# Altium integrated library XCZU15EG-F V1.0封装库.IntLib: 119 symbols
Pins are listed as number, name and electrical type; pins without a type are passive.

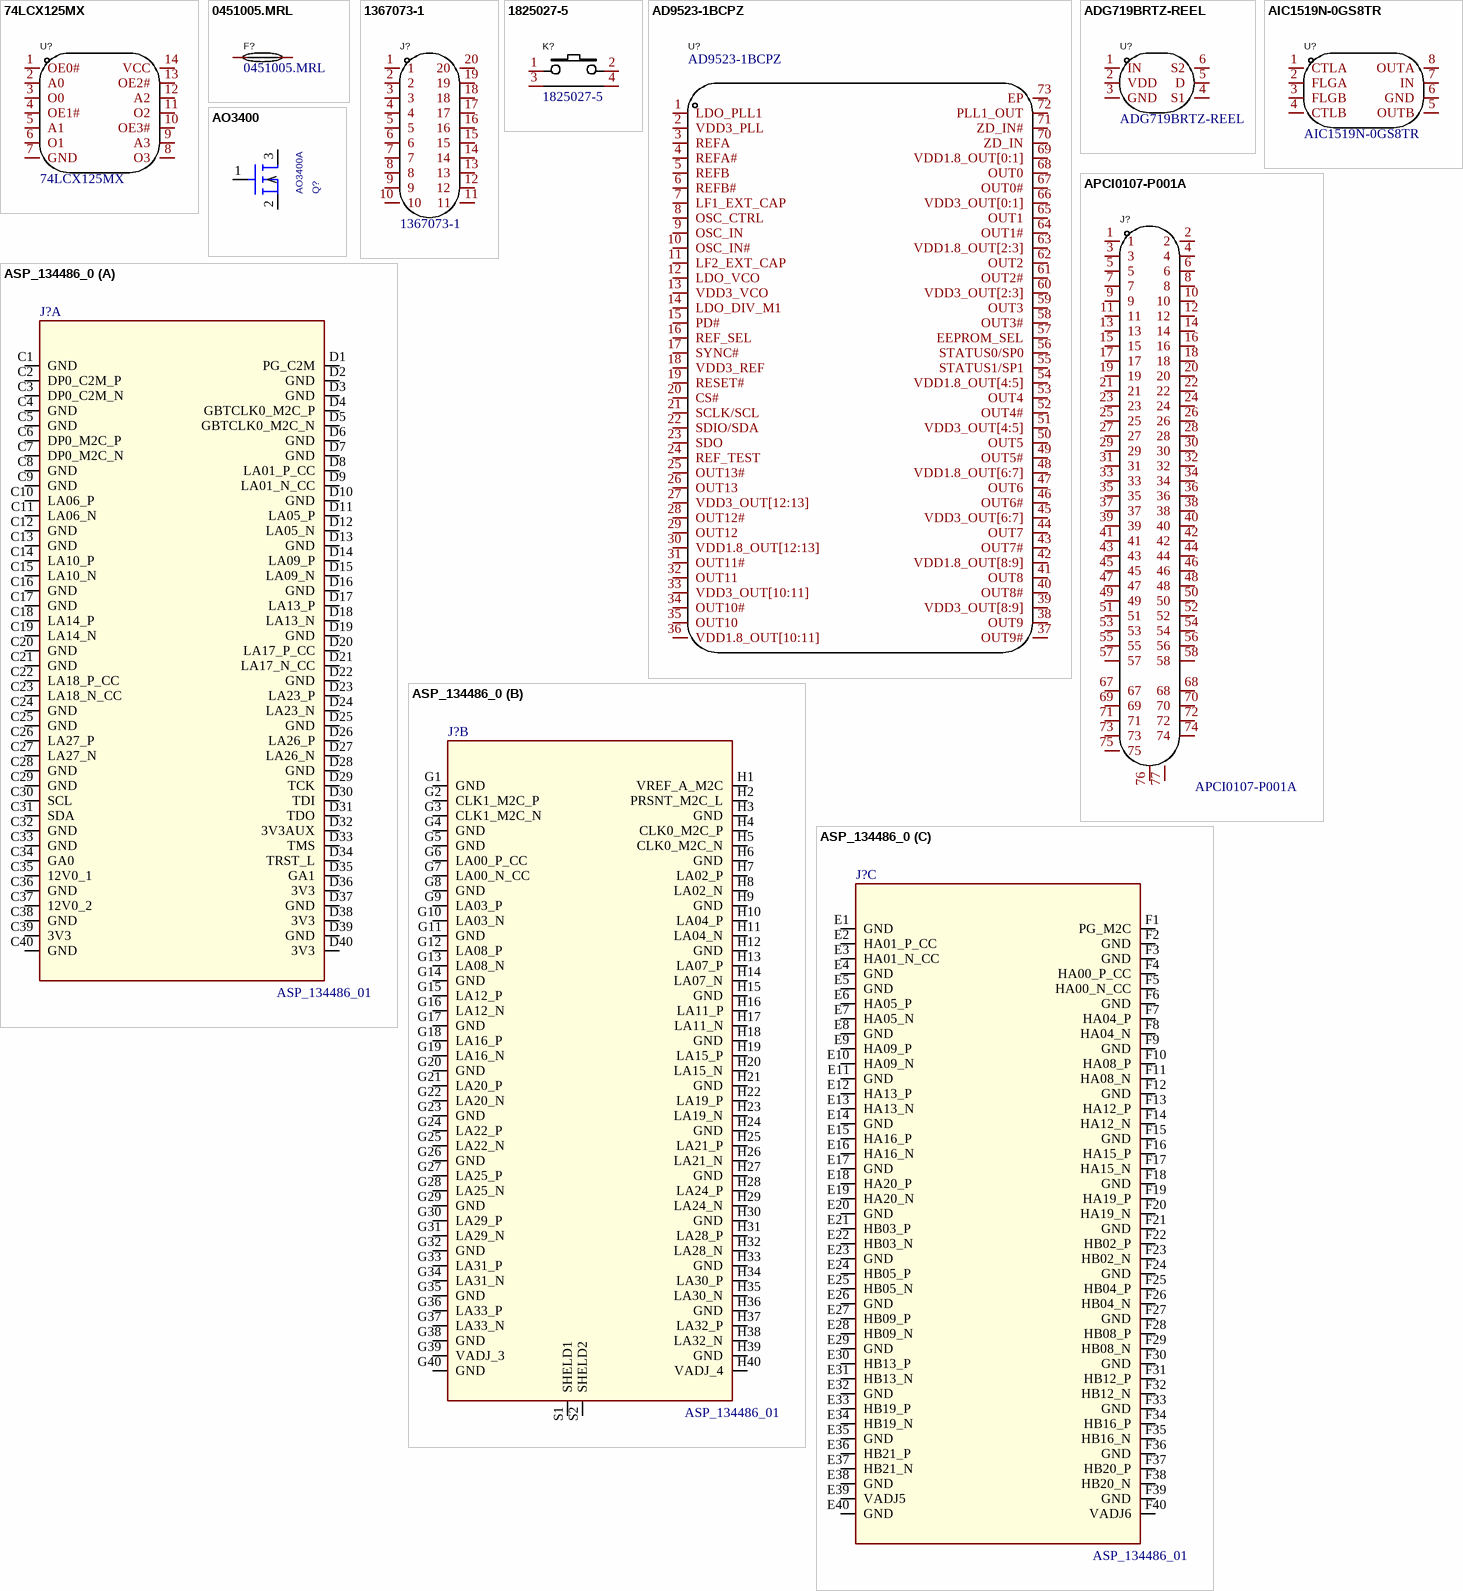
[diagram p0: symbols 74LCX125MX to ASP_134486_0]

## 74LCX125MX
designator U?
Manufacturer: onsemi(安森美); Add into BOM: yes; Name: 74LCX125MX; Symbol: 74LCX125MX; Device: 74LCX125MX; LCSC Part Name: 带 5V 耐受输入和输出的低压四路缓冲器; Supplier Part: C238953; Manufacturer Part: 74LCX125MX; Supplier Footprint: SOIC-14; JLCPCB Part Class: Extended Part; Datasheet: https://atta.szlcsc.com/upload/public/pdf/source/20181011/C238953_951DDD2013900C09DA0753F25BF700AB.pdf; Supplier: LCSC; Convert to PCB: yes
footprint SOIC127P600X175-14N
3D model SOIC-14_L8.6-W3.9-P1.27-LS6.0-BL
pins: 1 OE0#, 2 A0, 3 O0, 4 OE1#, 5 A1, 6 O1, 7 GND, 8 O3, 9 A3, 10 OE3#, 11 O2, 12 A2, 13 OE2#, 14 VCC

## 0451005.MRL
designator F?
Manufacturer: Littelfuse(美国力特); Add into BOM: yes; Type: 贴片式保险丝; Current Rating: 5A; Voltage Rating  (AC): 125V; Breaking Capacity: 50A; Name: 0451005.MRL; Symbol: 0451005.MRL; Device: 0451005.MRL; LCSC Part Name: 5A 125V 超快断; Supplier Part: C48467; Manufacturer Part: 0451005.MRL; Supplier Footprint: SMD; JLCPCB Part Class: Extended Part; Datasheet: https://atta.szlcsc.com/upload/public/pdf/source/20171109/C48467_15102201734031103760.pdf; Supplier: LCSC; Convert to PCB: yes; Voltage Rating (DC): 125V; Operating Temperature: -55℃~+125℃
footprint FUSE-SMD_L6.1-W2.6
3D model FUSE-SMD_L6.1-W2.6-H2.6
pins: 1, 2

## 1367073-1
designator J?
Manufacturer: TE Connectivity(美国泰科); Add into BOM: yes; Connector Type: SFP; Pitch: 0.8mm; Name: 1367073-1; Symbol: 1367073-1; Device: 1367073-1; LCSC Part Name: SFP 0.8mm P数:20; Supplier Part: C210158; Manufacturer Part: 1367073-1; Supplier Footprint: SMD,P=0.8mm; JLCPCB Part Class: Extended Part; Datasheet: https://atta.szlcsc.com/upload/public/pdf/source/20180424/C210158_9AFB8833F6096AB4A074A402FFBE4003.pdf; Supplier: LCSC; Convert to PCB: yes; Number of Pins: 20; Mounting Style: 卧贴; Height Above Board: 5.4mm; Operating Temperature Range: -
footprint SFP-SMD_1367073-1
3D model SFP-SMD_1367073-1
pins: 1, 2, 3, 4, 5, 6, 7, 8, 9, 10, 11, 12, 13, 14, 15, 16, 17, 18, 19, 20

## 1825027-5
designator K?
Manufacturer: TE Connectivity(美国泰科); Add into BOM: yes; Contact Current: 50mA; Voltage Rating (DC): 24V; Circuit: 单刀单掷; Actuator Style: 圆形按钮; Switch Length: 7mm; Switch Width: 3.5mm; Switch Height: 1.24mm; Name: 1825027-5; Symbol: 1825027-5; Device: 1825027-5; LCSC Part Name: 7*3.5*1.24mm 卧插 轻触开关; Supplier Part: C86476; Manufacturer Part: 1825027-5; Supplier Footprint: 插件; JLCPCB Part Class: Extended Part; Datasheet: https://atta.szlcsc.com/upload/public/pdf/source/20161105/1478330327555.pdf; Supplier: LCSC; Convert to PCB: yes; Mounting Style: 卧插; With Lamp: -; Mechanical Life: -
footprint KEY-TH_4P-L7.5-W6.8-P4.50-LS7.2
3D model KEY-TH_4P-L7.5-W6.8-P4.50-LS7.2
pins: 1, 2, 3 MH1, 4 MH2

## AD9523-1BCPZ
designator U?
Manufacturer: ADI(亚德诺)/LINEAR; Add into BOM: yes; Name: AD9523-1BCPZ; Symbol: AD9523-1BCPZ; Device: AD9523-1BCPZ; LCSC Part Name: AD9523-1BCPZ; Supplier Part: C653546; Manufacturer Part: AD9523-1BCPZ; Supplier Footprint: LFCSP-72; JLCPCB Part Class: Extended Part; Datasheet: https://atta.szlcsc.comnull; Supplier: LCSC; Convert to PCB: yes
footprint QFN50P975X1000X100-73N-D
3D model LFCSP-72_L10.0-W10.0-H0.9-P0.50-BL-EP4.7
pins: 1 LDO_PLL1, 2 VDD3_PLL, 3 REFA, 4 REFA#, 5 REFB, 6 REFB#, 7 LF1_EXT_CAP, 8 OSC_CTRL, 9 OSC_IN, 10 OSC_IN#, 11 LF2_EXT_CAP, 12 LDO_VCO, 13 VDD3_VCO, 14 LDO_DIV_M1, 15 PD#, 16 REF_SEL, 17 SYNC#, 18 VDD3_REF, 19 RESET#, 20 CS#, 21 SCLK/SCL, 22 SDIO/SDA, 23 SDO, 24 REF_TEST, 25 OUT13#, 26 OUT13, 27 VDD3_OUT[12:13], 28 OUT12#, 29 OUT12, 30 VDD1.8_OUT[12:13], 31 OUT11#, 32 OUT11, 33 VDD3_OUT[10:11], 34 OUT10#, 35 OUT10, 36 VDD1.8_OUT[10:11], 37 OUT9#, 38 OUT9, 39 VDD3_OUT[8:9], 40 OUT8#, 41 OUT8, 42 VDD1.8_OUT[8:9], 43 OUT7#, 44 OUT7, 45 VDD3_OUT[6:7], 46 OUT6#, 47 OUT6, 48 VDD1.8_OUT[6:7], 49 OUT5#, 50 OUT5, 51 VDD3_OUT[4:5], 52 OUT4#, 53 OUT4, 54 VDD1.8_OUT[4:5], 55 STATUS1/SP1, 56 STATUS0/SP0, 57 EEPROM_SEL, 58 OUT3#, 59 OUT3, 60 VDD3_OUT[2:3], 61 OUT2#, 62 OUT2, 63 VDD1.8_OUT[2:3], 64 OUT1#, 65 OUT1, 66 VDD3_OUT[0:1], 67 OUT0#, 68 OUT0, 69 VDD1.8_OUT[0:1], 70 ZD_IN, 71 ZD_IN#, 72 PLL1_OUT, 73 EP

## ADG719BRTZ-REEL
designator U?
Manufacturer: ADI(亚德诺)/LINEAR(凌特); Add into BOM: yes; Name: ADG719BRTZ-REEL; Symbol: ADG719BRTZ-REEL; Device: ADG719BRTZ-REEL; LCSC Part Name: ADG719BRTZ-REEL; Supplier Part: C579097; Manufacturer Part: ADG719BRTZ-REEL; Supplier Footprint: SOT-23-6; JLCPCB Part Class: Extended Part; Datasheet: https://atta.szlcsc.com/upload/public/pdf/source/20210224/C579097_EADA6BC909D9A920B352ABFA41AC0F4A.pdf; Supplier: LCSC; Convert to PCB: yes
footprint SOT23-6L (3x1.6x1.1mm(长宽高))
3D model SOT-23-6_L2.9-W1.6-H1.5-LS2.8-P0.95
pins: 1 IN, 2 VDD, 3 GND, 4 S1, 5 D, 6 S2

## AIC1519N-0GS8TR
designator U?
Manufacturer: AIC(沛亨半导体); Add into BOM: yes; Name: AIC1519N-0GS8TR; Symbol: AIC1519N-0GS8TR; Device: AIC1519N-0GS8TR; LCSC Part Name: AIC1519N-0GS8TR; Supplier Part: C211637; Manufacturer Part: AIC1519N-0GS8TR; Supplier Footprint: SOP-8; JLCPCB Part Class: Extended Part; Datasheet: https://atta.szlcsc.com/upload/public/pdf/source/20180412/C211637_FBDD21F597983625A50951D5B97D9666.pdf; Supplier: LCSC; Convert to PCB: yes
footprint SOP8
3D model SOP-8_L5.0-W4.0-H1.8-LS6.2-P1.27
pins: 1 CTLA, 2 FLGA, 3 FLGB, 4 CTLB, 5 OUTB, 6 GND, 7 IN, 8 OUTA

## AO3400
designator Q?, comment AO3400A
PSpiceTemplate: X^@REFDES %d %g %s @MODEL
footprint SOT23-3L (3x1.3x1mm(长宽高))
simulation model AO3400
pins: 1 G, 2 S, 3 D

## APCI0107-P001A
designator J?
Designer: U?; Symbol: APCI0107-P001A; Device: APCI0107-P001A
footprint CONN-SMD_APCI0107-P001A
pins: 1, 2, 3, 4, 5, 6, 7, 8, 9, 10, 11, 12, 13, 14, 15, 16, 17, 18, 19, 20, 21, 22, 23, 24, 25, 26, 27, 28, 29, 30, 31, 32, 33, 34, 35, 36, 37, 38, 39, 40, 41, 42, 43, 44, 45, 46, 47, 48, 49, 50, 51, 52, 53, 54, 55, 56, 57, 58, 67, 68, 69, 70, 71, 72, 73, 74, 75, 76, 77

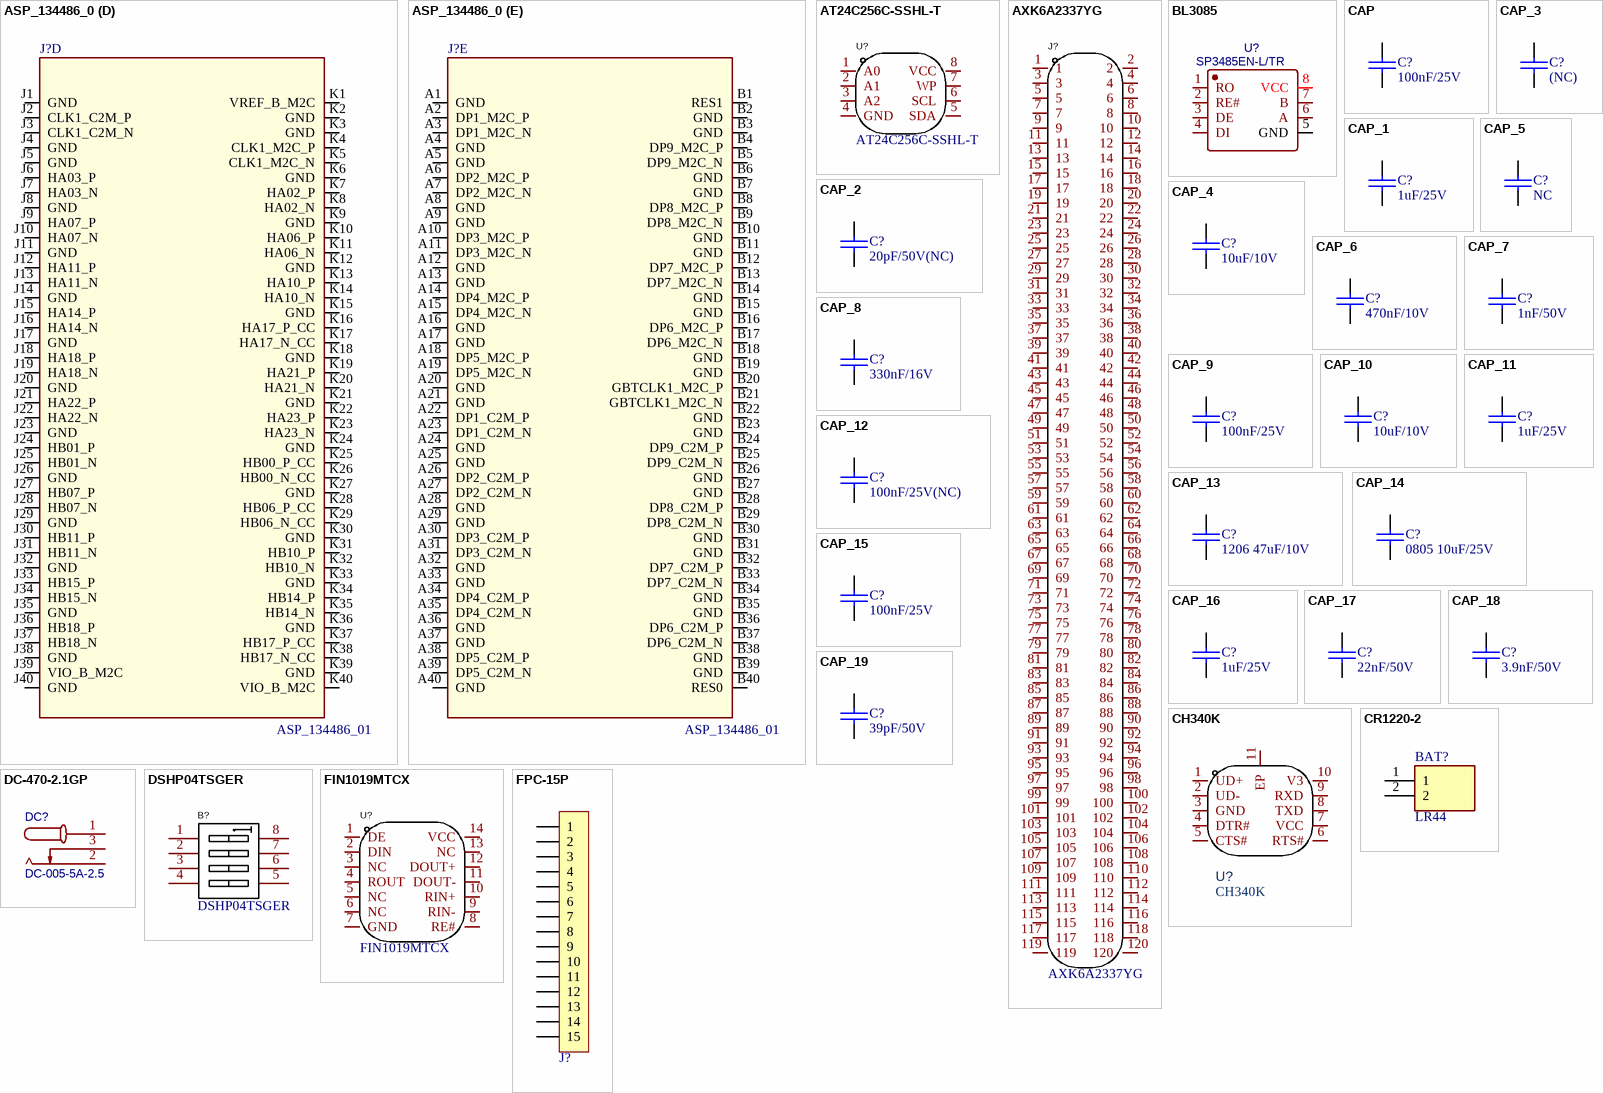
[diagram p1: symbols ASP_134486_0 to FPC-15P]

## ASP_134486_0
designator J?, comment ASP_134486_01
footprint ASP13448601
part A pins: C1 GND (power), C2 DP0_C2M_P, C3 DP0_C2M_N, C4 GND (power), C5 GND (power), C6 DP0_M2C_P, C7 DP0_M2C_N, C8 GND (power), C9 GND (power), C10 LA06_P, C11 LA06_N, C12 GND (power), C13 GND (power), C14 LA10_P, C15 LA10_N, C16 GND (power), C17 GND (power), C18 LA14_P, C19 LA14_N, C20 GND (power), C21 GND (power), C22 LA18_P_CC, C23 LA18_N_CC, C24 GND (power), C25 GND (power), C26 LA27_P, C27 LA27_N, C28 GND (power), C29 GND (power), C30 SCL, C31 SDA, C32 GND (power), C33 GND (power), C34 GA0, C35 12V0_1, C36 GND (power), C37 12V0_2, C38 GND (power), C39 3V3 (power), C40 GND (power), D1 PG_C2M, D2 GND (power), D3 GND (power), D4 GBTCLK0_M2C_P, D5 GBTCLK0_M2C_N, D6 GND (power), D7 GND (power), D8 LA01_P_CC, D9 LA01_N_CC, D10 GND (power), D11 LA05_P, D12 LA05_N, D13 GND (power), D14 LA09_P, D15 LA09_N, D16 GND (power), D17 LA13_P, D18 LA13_N, D19 GND (power), D20 LA17_P_CC, D21 LA17_N_CC, D22 GND (power), D23 LA23_P, D24 LA23_N, D25 GND (power), D26 LA26_P, D27 LA26_N, D28 GND (power), D29 TCK, D30 TDI, D31 TDO, D32 3V3AUX, D33 TMS, D34 TRST_L, D35 GA1, D36 3V3 (power), D37 GND (power), D38 3V3 (power), D39 GND (power), D40 3V3 (power)
part B pins: G1 GND (power), G2 CLK1_M2C_P, G3 CLK1_M2C_N, G4 GND (power), G5 GND (power), G6 LA00_P_CC, G7 LA00_N_CC, G8 GND (power), G9 LA03_P, G10 LA03_N, G11 GND (power), G12 LA08_P, G13 LA08_N, G14 GND (power), G15 LA12_P, G16 LA12_N, G17 GND (power), G18 LA16_P, G19 LA16_N, G20 GND (power), G21 LA20_P, G22 LA20_N, G23 GND (power), G24 LA22_P, G25 LA22_N, G26 GND (power), G27 LA25_P, G28 LA25_N, G29 GND (power), G30 LA29_P, G31 LA29_N, G32 GND (power), G33 LA31_P, G34 LA31_N, G35 GND (power), G36 LA33_P, G37 LA33_N, G38 GND (power), G39 VADJ_3, G40 GND (power), H1 VREF_A_M2C, H2 PRSNT_M2C_L, H3 GND (power), H4 CLK0_M2C_P, H5 CLK0_M2C_N, H6 GND (power), H7 LA02_P, H8 LA02_N, H9 GND (power), H10 LA04_P, H11 LA04_N, H12 GND (power), H13 LA07_P, H14 LA07_N, H15 GND (power), H16 LA11_P, H17 LA11_N, H18 GND (power), H19 LA15_P, H20 LA15_N, H21 GND (power), H22 LA19_P, H23 LA19_N, H24 GND (power), H25 LA21_P, H26 LA21_N, H27 GND (power), H28 LA24_P, H29 LA24_N, H30 GND (power), H31 LA28_P, H32 LA28_N, H33 GND (power), H34 LA30_P, H35 LA30_N, H36 GND (power), H37 LA32_P, H38 LA32_N, H39 GND (power), H40 VADJ_4, S1 SHELD1, S2 SHELD2
part C pins: E1 GND (power), E2 HA01_P_CC, E3 HA01_N_CC, E4 GND (power), E5 GND (power), E6 HA05_P, E7 HA05_N, E8 GND (power), E9 HA09_P, E10 HA09_N, E11 GND (power), E12 HA13_P, E13 HA13_N, E14 GND (power), E15 HA16_P, E16 HA16_N, E17 GND (power), E18 HA20_P, E19 HA20_N, E20 GND (power), E21 HB03_P, E22 HB03_N, E23 GND (power), E24 HB05_P, E25 HB05_N, E26 GND (power), E27 HB09_P, E28 HB09_N, E29 GND (power), E30 HB13_P, E31 HB13_N, E32 GND (power), E33 HB19_P, E34 HB19_N, E35 GND (power), E36 HB21_P, E37 HB21_N, E38 GND (power), E39 VADJ5 (power), E40 GND (power), F1 PG_M2C, F2 GND (power), F3 GND (power), F4 HA00_P_CC, F5 HA00_N_CC, F6 GND (power), F7 HA04_P, F8 HA04_N, F9 GND (power), F10 HA08_P, F11 HA08_N, F12 GND (power), F13 HA12_P, F14 HA12_N, F15 GND (power), F16 HA15_P, F17 HA15_N, F18 GND (power), F19 HA19_P, F20 HA19_N, F21 GND (power), F22 HB02_P, F23 HB02_N, F24 GND (power), F25 HB04_P, F26 HB04_N, F27 GND (power), F28 HB08_P, F29 HB08_N, F30 GND (power), F31 HB12_P, F32 HB12_N, F33 GND (power), F34 HB16_P, F35 HB16_N, F36 GND (power), F37 HB20_P, F38 HB20_N, F39 GND (power), F40 VADJ6 (power)
part D pins: J1 GND (power), J2 CLK1_C2M_P, J3 CLK1_C2M_N, J4 GND (power), J5 GND (power), J6 HA03_P, J7 HA03_N, J8 GND (power), J9 HA07_P, J10 HA07_N, J11 GND (power), J12 HA11_P, J13 HA11_N, J14 GND (power), J15 HA14_P, J16 HA14_N, J17 GND (power), J18 HA18_P, J19 HA18_N, J20 GND (power), J21 HA22_P, J22 HA22_N, J23 GND (power), J24 HB01_P, J25 HB01_N, J26 GND (power), J27 HB07_P, J28 HB07_N, J29 GND (power), J30 HB11_P, J31 HB11_N, J32 GND (power), J33 HB15_P, J34 HB15_N, J35 GND (power), J36 HB18_P, J37 HB18_N, J38 GND (power), J39 VIO_B_M2C (power), J40 GND (power), K1 VREF_B_M2C, K2 GND (power), K3 GND (power), K4 CLK1_M2C_P, K5 CLK1_M2C_N, K6 GND (power), K7 HA02_P, K8 HA02_N, K9 GND (power), K10 HA06_P, K11 HA06_N, K12 GND (power), K13 HA10_P, K14 HA10_N, K15 GND (power), K16 HA17_P_CC, K17 HA17_N_CC, K18 GND (power), K19 HA21_P, K20 HA21_N, K21 GND (power), K22 HA23_P, K23 HA23_N, K24 GND (power), K25 HB00_P_CC, K26 HB00_N_CC, K27 GND (power), K28 HB06_P_CC, K29 HB06_N_CC, K30 GND (power), K31 HB10_P, K32 HB10_N, K33 GND (power), K34 HB14_P, K35 HB14_N, K36 GND (power), K37 HB17_P_CC, K38 HB17_N_CC, K39 GND (power), K40 VIO_B_M2C (power)
part E pins: A1 GND (power), A2 DP1_M2C_P, A3 DP1_M2C_N, A4 GND (power), A5 GND (power), A6 DP2_M2C_P, A7 DP2_M2C_N, A8 GND (power), A9 GND (power), A10 DP3_M2C_P, A11 DP3_M2C_N, A12 GND (power), A13 GND (power), A14 DP4_M2C_P, A15 DP4_M2C_N, A16 GND (power), A17 GND (power), A18 DP5_M2C_P, A19 DP5_M2C_N, A20 GND (power), A21 GND (power), A22 DP1_C2M_P, A23 DP1_C2M_N, A24 GND (power), A25 GND (power), A26 DP2_C2M_P, A27 DP2_C2M_N, A28 GND (power), A29 GND (power), A30 DP3_C2M_P, A31 DP3_C2M_N, A32 GND (power), A33 GND (power), A34 DP4_C2M_P, A35 DP4_C2M_N, A36 GND (power), A37 GND (power), A38 DP5_C2M_P, A39 DP5_C2M_N, A40 GND (power), B1 RES1, B2 GND (power), B3 GND (power), B4 DP9_M2C_P, B5 DP9_M2C_N, B6 GND (power), B7 GND (power), B8 DP8_M2C_P, B9 DP8_M2C_N, B10 GND (power), B11 GND (power), B12 DP7_M2C_P, B13 DP7_M2C_N, B14 GND (power), B15 GND (power), B16 DP6_M2C_P, B17 DP6_M2C_N, B18 GND (power), B19 GND (power), B20 GBTCLK1_M2C_P, B21 GBTCLK1_M2C_N, B22 GND (power), B23 GND (power), B24 DP9_C2M_P, B25 DP9_C2M_N, B26 GND (power), B27 GND (power), B28 DP8_C2M_P, B29 DP8_C2M_N, B30 GND (power), B31 GND (power), B32 DP7_C2M_P, B33 DP7_C2M_N, B34 GND (power), B35 GND (power), B36 DP6_C2M_P, B37 DP6_C2M_N, B38 GND (power), B39 GND (power), B40 RES0

## AT24C256C-SSHL-T
designator U?
Manufacturer: MICROCHIP(美国微芯); Add into BOM: yes; Name: AT24C256C-SSHL-T; Symbol: AT24C256C-SSHL-T; Device: AT24C256C-SSHL-T; LCSC Part Name: AT24C256C-SSHL-T; Supplier Part: C6482; Manufacturer Part: AT24C256C-SSHL-T; Supplier Footprint: SOIC-8-150mil; JLCPCB Part Class: Basic Part; Datasheet: https://atta.szlcsc.com/upload/public/pdf/source/20140724/1457707164965.pdf; Supplier: LCSC; Convert to PCB: yes
footprint SOIC127P600X175-8N
3D model SOIC-8_L4.9-W3.9-H1.7-LS6.0-P1.27
pins: 1 A0, 2 A1, 3 A2, 4 GND, 5 SDA, 6 SCL, 7 WP, 8 VCC

## AXK6A2337YG
designator J?
Designer: U?; Symbol: AXK6A2337YG; Device: AXK6A2337YG
footprint AXK6A2337YG
pins: 1, 2, 3, 4, 5, 6, 7, 8, 9, 10, 11, 12, 13, 14, 15, 16, 17, 18, 19, 20, 21, 22, 23, 24, 25, 26, 27, 28, 29, 30, 31, 32, 33, 34, 35, 36, 37, 38, 39, 40, 41, 42, 43, 44, 45, 46, 47, 48, 49, 50, 51, 52, 53, 54, 55, 56, 57, 58, 59, 60, 61, 62, 63, 64, 65, 66, 67, 68, 69, 70, 71, 72, 73, 74, 75, 76, 77, 78, 79, 80, 81, 82, 83, 84, 85, 86, 87, 88, 89, 90, 91, 92, 93, 94, 95, 96, 97, 98, 99, 100, 101, 102, 103, 104, 105, 106, 107, 108, 109, 110, 111, 112, 113, 114, 115, 116, 117, 118, 119, 120

## BL3085
designator U?, comment SP3485EN-L/TR
RS485芯片(3V-5.5V,10M); BOM_Manufacturer: BL; BOM_Manufacturer Part: BL3085; Contributor: LCSC; SMT Type: Extend; 物料编码: 6131.000108; BOM_Supplier: LCSC; BOM_Supplier Part: C128803; BOM_JLCPCB SMD: Yes; spicePre: U; spiceSymbolName: BL3085
footprint SOIC127P600X175-8N
pins: 1 RO, 2 RE#, 3 DE, 4 DI, 5 GND, 6 A, 7 B, 8 VCC

## CAP
designator C?, comment 100nF/25V
贴片X7R电容
footprint 0402_C
pins: 1, 2
2 alternate drawings of the same symbol

## CAP_1
designator C?, comment 1uF/25V
贴片X7R电容
footprint 0402_C
pins: 1, 2
2 alternate drawings of the same symbol

## CAP_2
designator C?, comment 20pF/50V(NC)
贴片X7R电容
footprint 0402_C
pins: 1, 2
2 alternate drawings of the same symbol

## CAP_3
designator C?, comment (NC)
贴片X7R电容
footprint 0402_C
pins: 1, 2
2 alternate drawings of the same symbol

## CAP_4
designator C?, comment 10uF/10V
贴片X7R电容
footprint 0402_C
pins: 1, 2
2 alternate drawings of the same symbol

## CAP_5
designator C?, comment NC
贴片X7R电容
footprint 0402_C
pins: 1, 2
2 alternate drawings of the same symbol

## CAP_6
designator C?, comment 470nF/10V
贴片X7R电容
footprint 0402_C
pins: 1, 2
2 alternate drawings of the same symbol

## CAP_7
designator C?, comment 1nF/50V
贴片X7R电容
footprint 0402_C
pins: 1, 2
2 alternate drawings of the same symbol

## CAP_8
designator C?, comment 330nF/16V
贴片X7R电容
footprint 0402_C
pins: 1, 2
2 alternate drawings of the same symbol

## CAP_9
designator C?, comment 100nF/25V
贴片X7R电容
footprint 0402_C
pins: 1, 2
2 alternate drawings of the same symbol

## CAP_10
designator C?, comment 10uF/10V
贴片X7R电容
footprint 0402_C
pins: 1, 2
2 alternate drawings of the same symbol

## CAP_11
designator C?, comment 1uF/25V
贴片X7R电容
footprint 0402_C
pins: 1, 2
2 alternate drawings of the same symbol

## CAP_12
designator C?, comment 100nF/25V(NC)
贴片X7R电容
footprint 0402_C
pins: 1, 2
2 alternate drawings of the same symbol

## CAP_13
designator C?, comment 1206 47uF/10V
贴片X7R电容
footprint 1206_C
pins: 1, 2
2 alternate drawings of the same symbol

## CAP_14
designator C?, comment 0805 10uF/25V
贴片X7R电容
footprint 0805_C
pins: 1, 2
2 alternate drawings of the same symbol

## CAP_15
designator C?, comment 100nF/25V
贴片X7R电容
footprint 0402_C
pins: 1, 2
2 alternate drawings of the same symbol

## CAP_16
designator C?, comment 1uF/25V
贴片X7R电容
footprint 0402_C
pins: 1, 2
2 alternate drawings of the same symbol

## CAP_17
designator C?, comment 22nF/50V
贴片X7R电容
footprint 0402_C
pins: 1, 2
2 alternate drawings of the same symbol

## CAP_18
designator C?, comment 3.9nF/50V
贴片X7R电容
footprint 0402_C
pins: 1, 2
2 alternate drawings of the same symbol

## CAP_19
designator C?, comment 39pF/50V
贴片X7R电容
footprint 0402_C
pins: 1, 2
2 alternate drawings of the same symbol

## CH340K
designator U?
Manufacturer: WCH(南京沁恒); Add into BOM: yes; Name: CH340K; Symbol: CH340K; Device: CH340K; LCSC Part Name: CH340K USB转串口芯片 CH340; Supplier Part: C968586; Manufacturer Part: CH340K; Supplier Footprint: ESOP-10-EP-150mil; JLCPCB Part Class: Extended Part; Datasheet: https://atta.szlcsc.com/upload/public/pdf/source/20200819/C84681_ADBED554CE321879DBD6B1D06488689C.pdf; Supplier: LCSC; Convert to PCB: yes; Applications Function: -; Protocol: -
footprint ESOP-10_L4.9-W3.9-P1.00-LS6.2-BL-EP
3D model ESOP-10_L4.9-W3.9-H1.4-P1.00-LS6.2-BL-EP
pins: 1 UD+, 2 UD-, 3 GND, 4 DTR#, 5 CTS#, 6 RTS#, 7 VCC, 8 TXD, 9 RXD, 10 V3, 11 EP

## CR1220-2
designator BAT?, comment LR44
g; Manufacturer_Name: Q&J; Manufacturer_Part_Number: CR1220-2; Geometry.Height: 4.1mm; Mouser Part Number: *; Mouser Price/Stock: *; Arrow Part Number: *; Arrow Price/Stock: *; Datasheet Link: https://datasheet.lcsc.com/szlcsc/Q-J-CR1220-2_C70381.pdf
footprint LR44 (BATT_CON)
pins: 1, 2

## DC-470-2.1GP
designator DC?, comment DC-005-5A-2.5
BOM_Manufacturer: GANGYUAN; BOM_Manufacturer Part: DC-470-2.1GP; Contributor: LCSC; BOM_Supplier: LCSC; BOM_Supplier Part: C194407; BOM_JLCPCB Part Class: Extended Part; spicePre: D; spiceSymbolName: DC-470-2.1GP
footprint DC-005 (5.5*2.1mm，DC30V,2.5A)
pins: 1, 2, 3

## DSHP04TSGER
designator B?
Designer: U?; Symbol: DSHP04TSGER; Device: DSHP04TSGER
footprint SW-SMD_8P-L6.7-W5.4-P1.27-LS8.4
pins: 1 A1, 2 A2, 3 A3, 4 A4, 5 B4, 6 B3, 7 B2, 8 B1

## FIN1019MTCX
designator U?
Manufacturer: onsemi(安森美); Add into BOM: yes; Name: FIN1019MTCX; Symbol: FIN1019MTCX; Device: FIN1019MTCX; LCSC Part Name: 3.3V LVDS 高速差分驱动器/接收器; Supplier Part: C903667; Manufacturer Part: FIN1019MTCX; Supplier Footprint: TSSOP-14; JLCPCB Part Class: Extended Part; Datasheet: https://atta.szlcsc.com/upload/public/pdf/source/20210120/C903667_F541ABBBE7CE719B12874E9A6280CC69.pdf; Supplier: LCSC; Convert to PCB: yes
footprint TSSOP14
3D model TSSOP-14_L5.0-W4.4-H1.0-LS6.4-P0.65
pins: 1 DE, 2 DIN, 3 NC, 4 ROUT, 5 NC, 6 NC, 7 GND, 8 RE#, 9 RIN-, 10 RIN+, 11 DOUT-, 12 DOUT+, 13 NC, 14 VCC

## FPC-15P
designator J?, comment FPC1.0-15P  (value not drawn)
FPC连接器; 版权归属: 源创客; BOM名称: FPC连接器; 学习资源: www.ooocke.com
footprint FPC1.0-2H-WS-15P (翻盖FPC，脚距1mm，不含脚（长19.9mm，宽5.2mm，高1.96mm）)
footprint FPC0.5 2H-WS-15P (长：11.7mm，宽：5.2mm，高：2mm)
footprint FPC1.0-2H-WS-15P (翻盖FPC，脚距1mm，不含脚（长19.9mm，宽5.2mm，高1.96mm）)
pins: 1, 2, 3, 4, 5, 6, 7, 8, 9, 10, 11, 12, 13, 14, 15

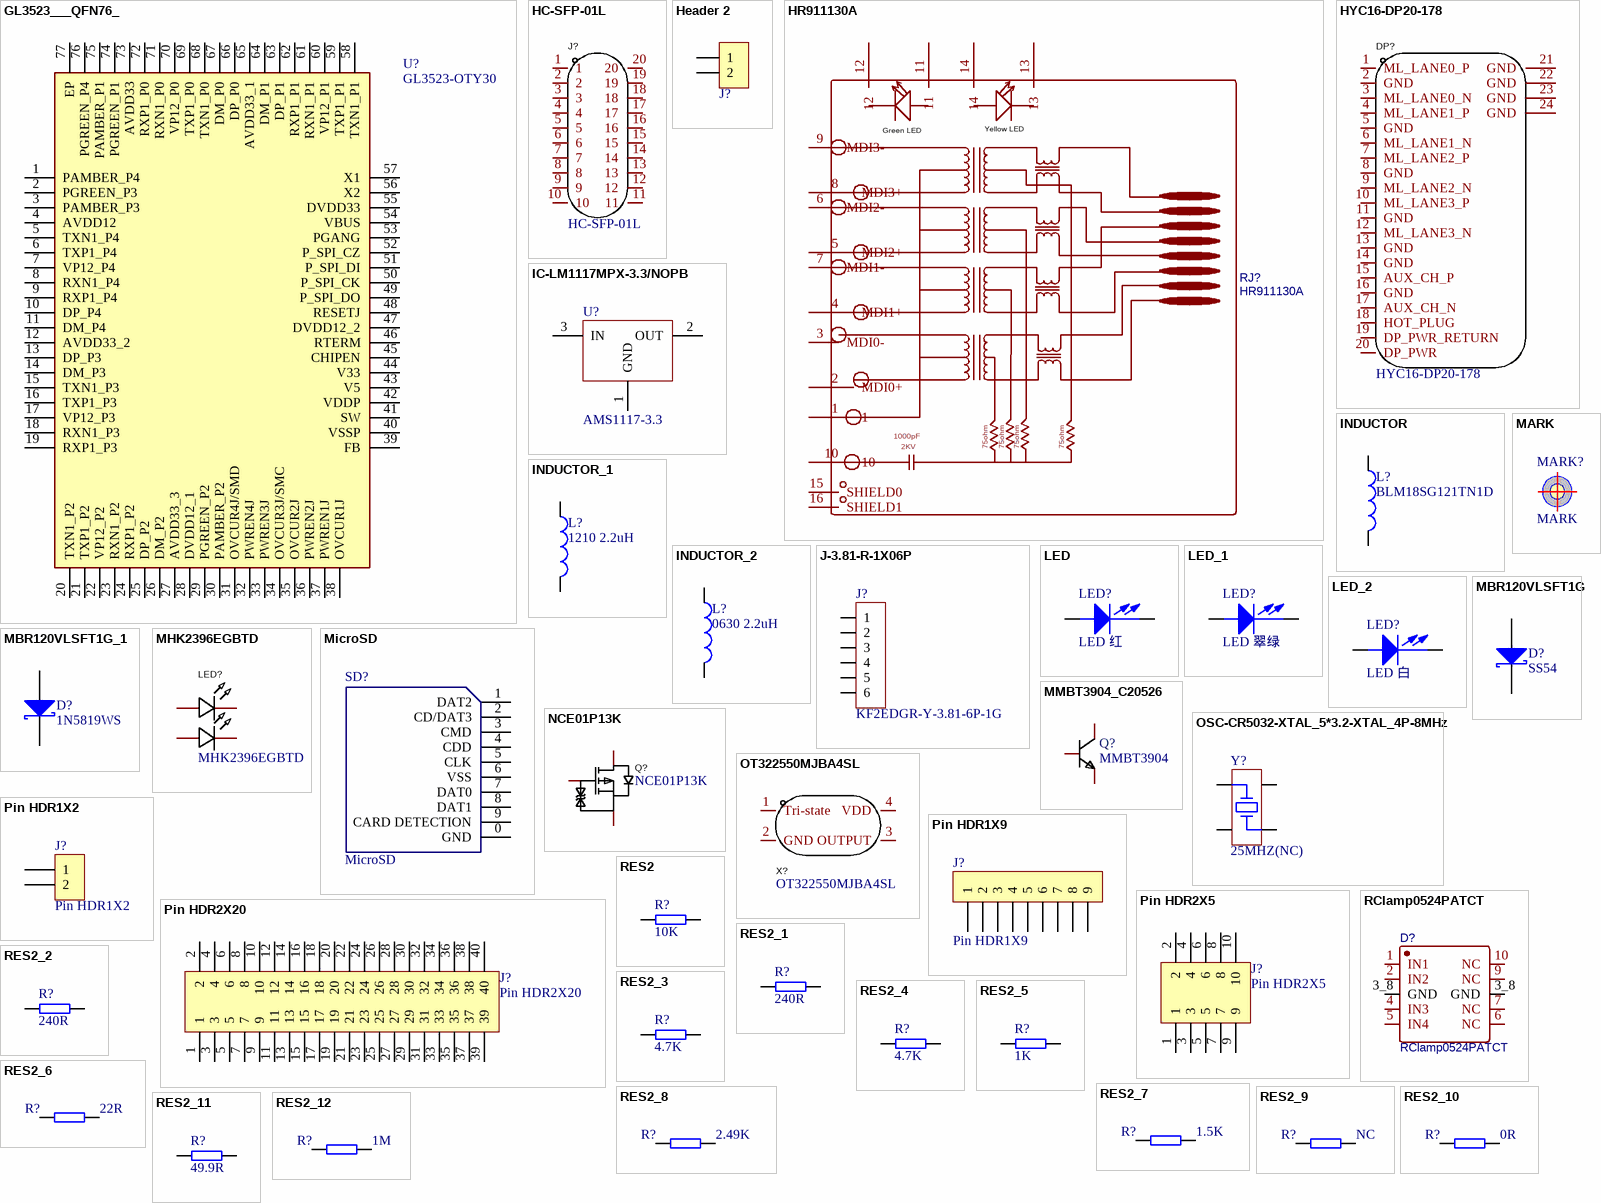
[diagram p2: symbols GL3523___QFN76_ to RES2_12]

## GL3523___QFN76_
designator U?, comment GL3523-OTY30
Integrated Circuit; Manufacturer_Name: Genesys; Manufacturer_Part_Number: GL3523  (QFN76); Datasheet Link: https://datasheetspdf.com/pdf-file/1345868/GenesysLogic/GL3523/1; Height: 0.9mm
footprint QFN40P900X900X90-77N-D
pins: 1 PAMBER_P4, 2 PGREEN_P3, 3 PAMBER_P3, 4 AVDD12, 5 TXN1_P4, 6 TXP1_P4, 7 VP12_P4, 8 RXN1_P4, 9 RXP1_P4, 10 DP_P4, 11 DM_P4, 12 AVDD33_2, 13 DP_P3, 14 DM_P3, 15 TXN1_P3, 16 TXP1_P3, 17 VP12_P3, 18 RXN1_P3, 19 RXP1_P3, 20 TXN1_P2, 21 TXP1_P2, 22 VP12_P2, 23 RXN1_P2, 24 RXP1_P2, 25 DP_P2, 26 DM_P2, 27 AVDD33_3, 28 DVDD12_1, 29 PGREEN_P2, 30 PAMBER_P2, 31 OVCUR4J/SMD, 32 PWREN4J, 33 PWREN3J, 34 OVCUR3J/SMC, 35 OVCUR2J, 36 PWREN2J, 37 PWREN1J, 38 OVCUR1J, 39 FB, 40 VSSP, 41 SW, 42 VDDP, 43 V5, 44 V33, 45 CHIPEN, 46 RTERM, 47 DVDD12_2, 48 RESETJ, 49 P_SPI_DO, 50 P_SPI_CK, 51 P_SPI_DI, 52 P_SPI_CZ, 53 PGANG, 54 VBUS, 55 DVDD33, 56 X2, 57 X1, 58 TXN1_P1, 59 TXP1_P1, 60 VP12_P1, 61 RXN1_P1, 62 RXP1_P1, 63 DP_P1, 64 DM_P1, 65 AVDD33_1, 66 DP_P0, 67 DM_P0, 68 TXN1_P0, 69 TXP1_P0, 70 VP12_P0, 71 RXN1_P0, 72 RXP1_P0, 73 AVDD33, 74 PGREEN_P1, 75 PAMBER_P1, 76 PGREEN_P4, 77 EP

## HC-SFP-01L
designator J?
Manufacturer: HCTL(华灿天禄); Add into BOM: yes; Name: HC-SFP-01L; Symbol: HC-SFP-01L; Device: HC-SFP-01L; LCSC Part Name: SFP外壳; Supplier Part: C2897292; Manufacturer Part: HC-SFP-01L; Supplier Footprint: -; JLCPCB Part Class: Extended Part; Datasheet: https://atta.szlcsc.com/upload/public/pdf/source/20230418/28FB36C4D88CF8CA324EA23CADB75FA2.pdf; Supplier: LCSC; Convert to PCB: yes
footprint TH_HC-SFP-01L
3D model TH_HC-SFP-01L
pins: 1, 2, 3, 4, 5, 6, 7, 8, 9, 10, 11, 12, 13, 14, 15, 16, 17, 18, 19, 20

## Header 2
designator J?, comment HDR-1X2  (value not drawn)
2P接插件; 版权归属: 源创客; BOM名称: 2P接插件; 学习资源: www.ooocke.com
footprint XH2.54-LI-2P (接插件，2P)
footprint XH2.54-LI-2P (接插件，2P)
footprint HDR2.54-LI-2P (排针，2脚)
footprint HDR2.54-M-LI-2P (排母，2脚)
footprint HDR2.54-WI-2P (弯脚排针，2脚)
footprint HDR2.54-WS-2P (2P卧式贴片排针2.54)
footprint HDR2.54-Y-LI-2P (圆孔排母，2脚)
footprint HDR2.54-M-WS-2P (2P卧式贴片排母2.54)
footprint KF2510-LI-2P (接插件/2A)
footprint XH2.54-WS-2P (长：10mm，宽：8mm，高：6.1mm)
footprint XH2.54-LS-2P (长：10mm，宽：6mm，高：8.3mm)
footprint KF2EDGK-2.54-LI-2P (长：6.93mm，宽：8.1mm，高：10.1mm)
footprint KF2EDGK-2.54-WI-2P (长：6.93mm，宽：10.1mm，高：8.1mm)
pins: 1, 2

## HR911130A
designator RJ?
BOM_Manufacturer: HANRUN; BOM_Supplier: LCSC; BOM_Manufacturer Part: HR911130A; BOM_Supplier Part: C54408; BOM_JLCPCB Part Class: Extended Part; spicePre: R; spiceSymbolName: HR911130A
footprint HR911130A
pins: 1, 2 MDI0+, 3 MDI0-, 4 MDI1+, 5 MDI2+, 6 MDI2-, 7 MDI1-, 8 MDI3+, 9 MDI3-, 10, 11, 12, 13, 14, 15 SHIELD0, 16 SHIELD1
text: Yellow LED; Green LED; J8; J7; J6 RX-; J5; J4; J3 RX+; J2 TX-; J1 TX+; 1000pF; 75ohm; 2KV

## HYC16-DP20-178
designator DP?
Manufacturer: 华宇创; Add into BOM: yes; Connector Type: DisplayPort; Gender: 母; Current Rating (Max): 500mA; Name: HYC16-DP20-178; Symbol: HYC16-DP20-178; Device: HYC16-DP20-178; LCSC Part Name: DisplayPort 母 P数:20 DP 有弹无卡点; Supplier Part: C711350; Manufacturer Part: HYC16-DP20-178; Supplier Footprint: SMD; JLCPCB Part Class: Extended Part; Datasheet: https://atta.szlcsc.com/upload/public/pdf/source/20200812/C711350_819FDC86A5F88806D55082D40EAA95DA.pdf; Supplier: LCSC; Convert to PCB: yes; Number of Pins: 20; Number of Rows: -; Mounting Style: 卧贴; Operating Temperature Range: -25℃~+85℃
footprint DP-SMD_HYC16-DP20-178
3D model DP-SMD_HYC16-DP20-178
pins: 1 ML_LANE0_P, 2 GND, 3 ML_LANE0_N, 4 ML_LANE1_P, 5 GND, 6 ML_LANE1_N, 7 ML_LANE2_P, 8 GND, 9 ML_LANE2_N, 10 ML_LANE3_P, 11 GND, 12 ML_LANE3_N, 13 GND, 14 GND, 15 AUX_CH_P, 16 GND, 17 AUX_CH_N, 18 HOT_PLUG, 19 DP_PWR_RETURN, 20 DP_PWR, 21 GND, 22 GND, 23 GND, 24 GND

## IC-LM1117MPX-3.3/NOPB
designator U?, comment AMS1117-3.3
贴片芯片（电源芯片）TI; 物料编码: 6131.000050
footprint SOT223_L (6.4x7x1.6mm(长宽高))
pins: 1 GND, 2 OUT, 3 IN

## INDUCTOR
designator L?, comment BLM18SG121TN1D
footprint 0603_L
pins: 1, 2

## INDUCTOR_1
designator L?, comment 1210 2.2uH
footprint FB 1210_L (小功率贴片磁珠)
pins: 1, 2

## INDUCTOR_2
designator L?, comment 0630 2.2uH
footprint L-SMD-0630 (一体化成型电感)
pins: 1, 2

## J-3.81-R-1X06P
designator J?, comment KF2EDGR-Y-3.81-6P-1G
插拔式接线端子（弯针）  品牌：凯峰; 物料编码: 6341.000869
footprint ECH381R-06P (Connector; Header; 6 Position; Right Angle)
pins: 1, 2, 3, 4, 5, 6

## LED
designator LED?, comment LED 红
footprint LED-0603G
pins: A ANODE, K CATHODE

## LED_1
designator LED?, comment LED 翠绿
footprint LED-0603G
pins: A ANODE, K CATHODE

## LED_2
designator LED?, comment LED 白
footprint LED-0603G
pins: A ANODE, K CATHODE

## MARK
designator MARK?
MARK点
footprint Mark 1 (光学定位点，直径1mm)

## MBR120VLSFT1G
designator D?, comment SS54
Silicon RF Schottky Diode for Mixer Applications in the VHF/UHF Range; Note: Pin 2 is not connected and not drawn.; Published: 21-Mar-2003; LatestRevisionDate: 29-May-2009; LatestRevisionNote: IPC-7351 Footprint Added.; DatasheetVersion: Oct-1999; PackageVersion: Sep-2001; PackageReference: SOT-23; Publisher: Altium Limited; PackageDescription: 3-Pin SOT-23 Package 0.95 mm Pitch, 2.5 mm Lead Span; ComponentLink1Description: Manufacturer Link; ComponentLink1URL: http://www.infineon.com/; ComponentLink2Description: Datasheet; ComponentLink2URL: http://www.infineon.com/upload/Document/cmc_upload/documents/009/363/bat17series.pdf
simulation model D188 (DIODE)
footprint SOD-323
footprint SMA(DO-214AC)
footprint SMA/DO-214AC (塑封二极管)
pins: A, K

## MBR120VLSFT1G_1
designator D?, comment 1N5819WS
Silicon RF Schottky Diode for Mixer Applications in the VHF/UHF Range; Note: Pin 2 is not connected and not drawn.; Published: 21-Mar-2003; LatestRevisionDate: 29-May-2009; LatestRevisionNote: IPC-7351 Footprint Added.; DatasheetVersion: Oct-1999; PackageVersion: Sep-2001; PackageReference: SOT-23; Publisher: Altium Limited; PackageDescription: 3-Pin SOT-23 Package 0.95 mm Pitch, 2.5 mm Lead Span; ComponentLink1Description: Manufacturer Link; ComponentLink1URL: http://www.infineon.com/; ComponentLink2Description: Datasheet; ComponentLink2URL: http://www.infineon.com/upload/Document/cmc_upload/documents/009/363/bat17series.pdf
simulation model D188 (DIODE)
footprint SOD-323 (塑封二极管)
pins: A, K

## MHK2396EGBTD
designator LED?
Manufacturer: MEIHUA(美华); Add into BOM: yes; Emitted Color: 橙红,普绿/黄绿; Lens Color: 雾状绿；雾状红; Dominant Wavelength: 568nm；628nm; Forward Current: 20mA; Power Dissipation: 78mW; Viewing Angle: 80°; Lamp Holder Type: 组装式圆形灯头; Name: MHK2396EGBTD; Symbol: MHK2396EGBTD; Device: MHK2396EGBTD; LCSC Part Name: 橙红,普绿/黄绿; Supplier Part: C2962099; Manufacturer Part: MHK2396EGBTD; Supplier Footprint: 插件; JLCPCB Part Class: Extended Part; Datasheet: https://atta.szlcsc.com/upload/public/pdf/source/20220214/0A6E4FC1FFE28EF73BAB3827A18F262D.pdf; Supplier: LCSC; Convert to PCB: yes; Diode Configuration: -; Peak Wavelength: -; Color Temperature: -; Mounting Sytle: -; Operating Temperature: -25℃~+85℃
footprint LED-TH_4P-L11.8-W4.3-P2.54
3D model LED-TH_4P-L11.8-W4.3-P2.54
pins: 1, 2, 3, 4

## MicroSD
designator SD?
footprint Micro SD
pins: 0 GND, 1 DAT2, 2 CD/DAT3, 3 CMD, 4 CDD, 5 CLK, 6 VSS, 7 DAT0, 8 DAT1, 9 CARD DETECTION

## MMBT3904_C20526
designator Q?, comment MMBT3904
Manufacturer: CJ(江苏长电/长晶); Device: MMBT3904_C20526; Add into BOM: yes; Transistor Type: NPN; Collector-Emitter Breakdown Voltage (Vceo): 40V; Collector Current (Ic): 200mA; Power Dissipation (Pd): 200mW; Collector Cut-Off Current (Icbo): 100nA; Collector-Emitter Saturation Voltage (VCE(sat)@Ic,Ib): 300mV@50mA,5mA; DC Current Gain (hFE@Ic,Vce): 100@10mA,1V; Transition Frequency (fT): 300MHz; Name: MMBT3904; Symbol: MMBT3904; LCSC Part Name: NPN 40V 200mA 1AM  100-300; Supplier Part: C20526; Manufacturer Part: MMBT3904; Supplier Footprint: SOT-23; JLCPCB Part Class: Basic Part; Datasheet: https://atta.szlcsc.com/upload/public/pdf/source/20220704/70F575FB75061E03F919270A6BB8BA7F.pdf; Supplier: LCSC; Convert to PCB: yes; Operating Temperature: +150℃@(Tj)
footprint SOT23-3L (3x1.3x1mm(长宽高))
3D model SOT-23-3P_L2.9-W1.3-H1.0-LS2.4-P0.95
pins: 1 B, 2 E, 3 C

## NCE01P13K
designator Q?
Designer: U?; Symbol: NCE01P13K; Device: NCE01P13K
footprint TO252 (DPAK)
pins: 1 G, 2 D, 3 S

## OSC-CR5032-XTAL_5*3.2-XTAL_4P-8MHz
designator Y?, comment 25MHZ(NC)
8M晶体; 制造商: 香港晶体; 通用描述: CA-8MEFA20-IND
footprint OSC 3225-4P
pins: 1, 2, 3, 4

## OT322550MJBA4SL
designator X?
Manufacturer: YXC(扬兴科技); Name: 50MHz; Add into BOM: yes; Value: 50MHz; Frequency Stability: 10ppm; Supply Voltage: 1.8V~3.3V; Symbol: OT322550MJBA4SL; Device: OT322550MJBA4SL; LCSC Part Name: 50MHz 10ppm 1.8V~3.3V; Supplier Part: C717684; Manufacturer Part: OT322550MJBA4SL; Supplier Footprint: SMD3225-4P; JLCPCB Part Class: Extended Part; Datasheet: https://atta.szlcsc.com/upload/public/pdf/source/20210329/C669065_30B18CFE780D377BA4E84F6ED1951959.pdf; Supplier: LCSC; Convert to PCB: yes; Operating Temperature: -40℃~+85℃
footprint OSC 3225-4P
3D model OSC-SMD_4P-L3.2-W2.5-H1.0
pins: 1 Tri-state, 2 GND, 3 OUTPUT, 4 VDD

## Pin HDR1X2
designator J?
footprint Pin HDR1X2/2.54mm-S
footprint Pin HDR1X2/2.54mm-W (Connector; Header; 2 Position; Right Angle)
pins: 1, 2

## Pin HDR1X9
designator J?
footprint CONN-TH_LE18077-Z54D-4H
footprint Pin HDR1X9/2.54mm-W (Connector; Header; 9 Position; Right Angle)
pins: 1, 2, 3, 4, 5, 6, 7, 8, 9

## Pin HDR2X5
designator J?
footprint IDC2.54-LI-2x5P (10P简易牛角座)
footprint Pin HDR2X5/2.54mm-W (Connector; Header; 5x2 Position; Right Angle)
pins: 1, 2, 3, 4, 5, 6, 7, 8, 9, 10

## Pin HDR2X20
designator J?
footprint IDC2.54-LI-2x20P (40P简易牛角座)
footprint Pin HDR2X20/2.54mm-W (Connector; Header; 20x2 Position; Right Angle)
pins: 1, 2, 3, 4, 5, 6, 7, 8, 9, 10, 11, 12, 13, 14, 15, 16, 17, 18, 19, 20, 21, 22, 23, 24, 25, 26, 27, 28, 29, 30, 31, 32, 33, 34, 35, 36, 37, 38, 39, 40

## RClamp0524PATCT
designator D?
BOM_Manufacturer: SEMTECH; BOM_Supplier: LCSC; BOM_Manufacturer Part: RClamp0524PATCT; BOM_Supplier Part: C40960; BOM_JLCPCB Part Class: Extended Part; spicePre: D; spiceSymbolName: RClamp0524PATCT
footprint DIO_RCLAMP0524PATCT
pins: 1 IN1, 2 IN2, 3_8 GND, 3_8 GND, 4 IN3, 5 IN4, 6 NC, 7 NC, 9 NC, 10 NC

## RES2
designator R?, comment 10K
R
footprint 0402_R
pins: 1, 2
2 alternate drawings of the same symbol

## RES2_1
designator R?, comment 240R
R
footprint 0402_R
pins: 1, 2
2 alternate drawings of the same symbol

## RES2_2
designator R?, comment 240R
R
footprint 0402_R
pins: 1, 2
2 alternate drawings of the same symbol

## RES2_3
designator R?, comment 4.7K
R
footprint 0402_R
pins: 1, 2
2 alternate drawings of the same symbol

## RES2_4
designator R?, comment 4.7K
R
footprint 0402_R
pins: 1, 2
2 alternate drawings of the same symbol

## RES2_5
designator R?, comment 1K
R
footprint 0402_R
pins: 1, 2
2 alternate drawings of the same symbol

## RES2_6
designator R?, comment 22R
R
footprint 0402_R
pins: 1, 2
2 alternate drawings of the same symbol

## RES2_7
designator R?, comment 1.5K
R
footprint 0402_R
pins: 1, 2
2 alternate drawings of the same symbol

## RES2_8
designator R?, comment 2.49K
R
footprint 0402_R
pins: 1, 2
2 alternate drawings of the same symbol

## RES2_9
designator R?, comment NC
R
footprint 0402_R
pins: 1, 2
2 alternate drawings of the same symbol

## RES2_10
designator R?, comment 0R
R
footprint 0402_R
pins: 1, 2
2 alternate drawings of the same symbol

## RES2_11
designator R?, comment 49.9R
R
footprint 0402_R
pins: 1, 2
2 alternate drawings of the same symbol

## RES2_12
designator R?, comment 1M
R
footprint 0402_R
pins: 1, 2
2 alternate drawings of the same symbol

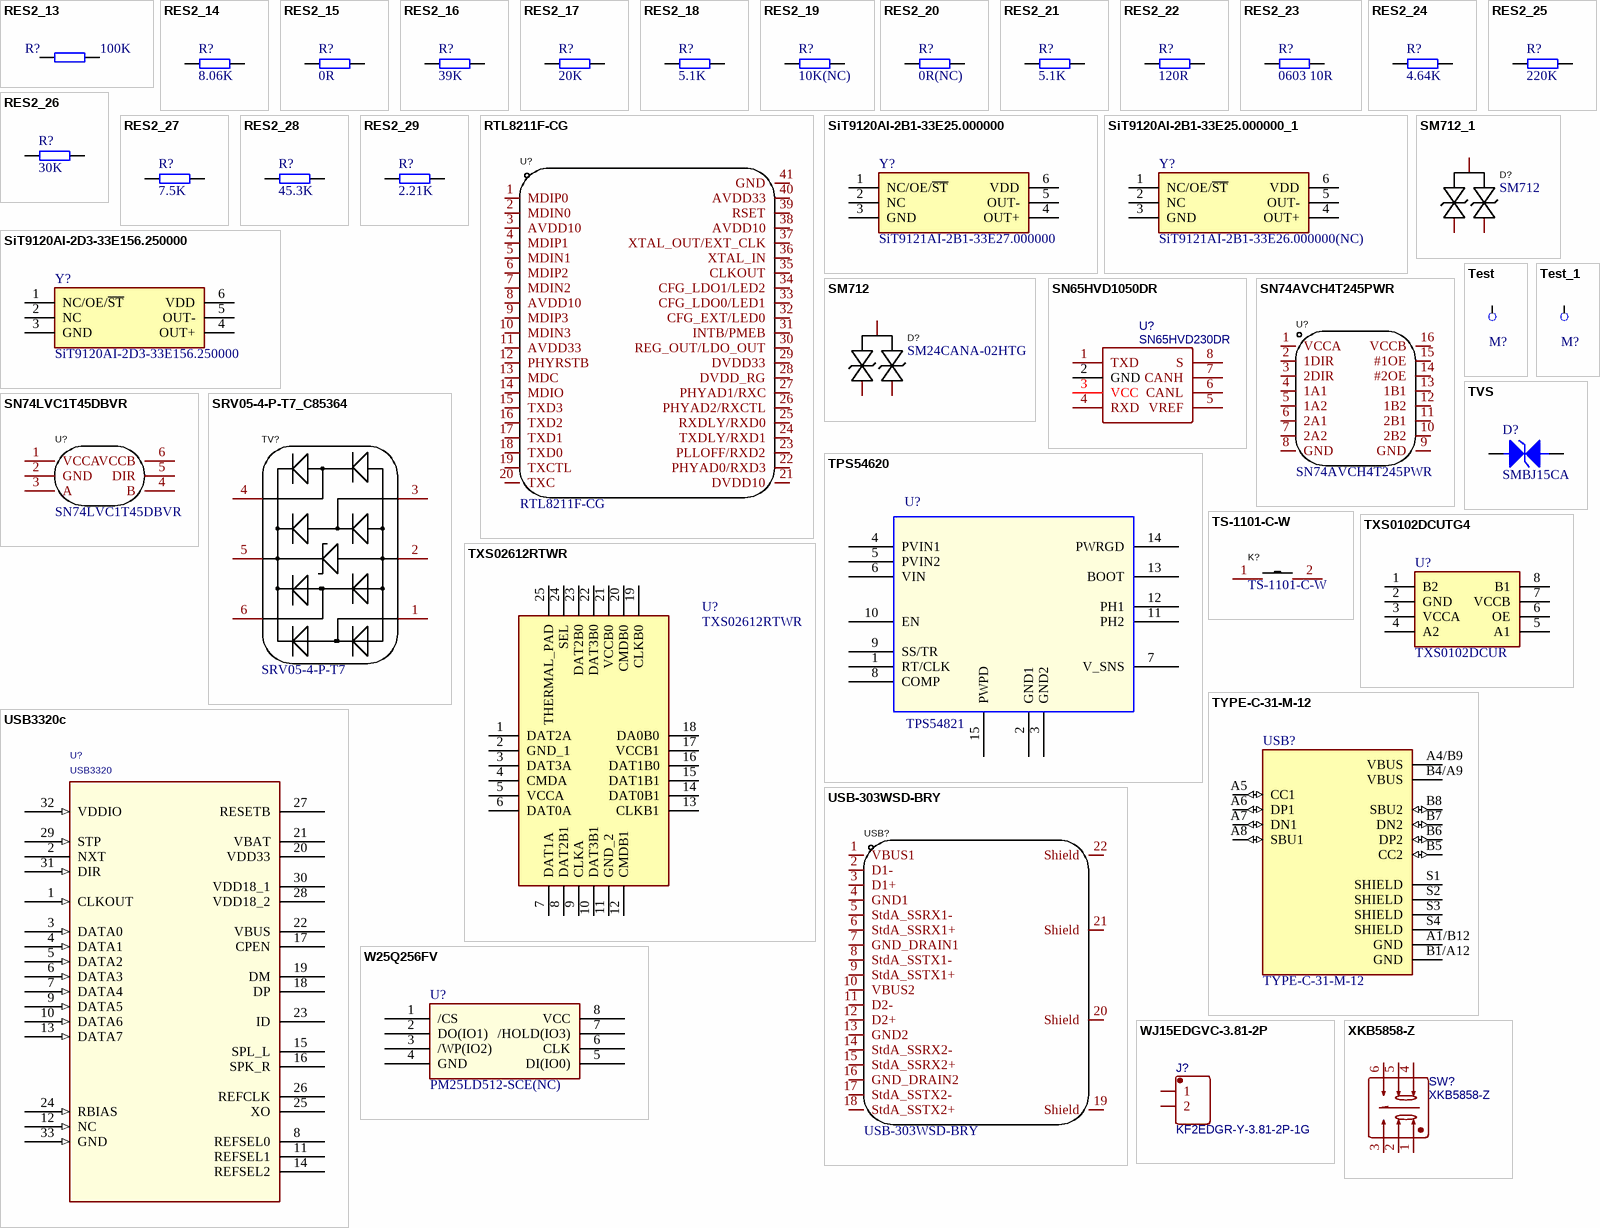
[diagram p3: symbols RES2_13 to XKB5858-Z]

## RES2_13
designator R?, comment 100K
R
footprint 0402_R
pins: 1, 2
2 alternate drawings of the same symbol

## RES2_14
designator R?, comment 8.06K
R
footprint 0402_R
pins: 1, 2
2 alternate drawings of the same symbol

## RES2_15
designator R?, comment 0R
R
footprint 0402_R
pins: 1, 2
2 alternate drawings of the same symbol

## RES2_16
designator R?, comment 39K
R
footprint 0402_R
pins: 1, 2
2 alternate drawings of the same symbol

## RES2_17
designator R?, comment 20K
R
footprint 0402_R
pins: 1, 2
2 alternate drawings of the same symbol

## RES2_18
designator R?, comment 5.1K
R
footprint 0402_R
pins: 1, 2
2 alternate drawings of the same symbol

## RES2_19
designator R?, comment 10K(NC)
R
footprint 0402_R
pins: 1, 2
2 alternate drawings of the same symbol

## RES2_20
designator R?, comment 0R(NC)
R
footprint 0402_R
pins: 1, 2
2 alternate drawings of the same symbol

## RES2_21
designator R?, comment 5.1K
R
footprint 0402_R
pins: 1, 2
2 alternate drawings of the same symbol

## RES2_22
designator R?, comment 120R
R
footprint 0402_R
pins: 1, 2
2 alternate drawings of the same symbol

## RES2_23
designator R?, comment 0603 10R
R
footprint 0603_R
pins: 1, 2
2 alternate drawings of the same symbol

## RES2_24
designator R?, comment 4.64K
R
footprint 0402_R
pins: 1, 2
2 alternate drawings of the same symbol

## RES2_25
designator R?, comment 220K
R
footprint 0402_R
pins: 1, 2
2 alternate drawings of the same symbol

## RES2_26
designator R?, comment 30K
R
footprint 0402_R
pins: 1, 2
2 alternate drawings of the same symbol

## RES2_27
designator R?, comment 7.5K
R
footprint 0402_R
pins: 1, 2
2 alternate drawings of the same symbol

## RES2_28
designator R?, comment 45.3K
R
footprint 0402_R
pins: 1, 2
2 alternate drawings of the same symbol

## RES2_29
designator R?, comment 2.21K
R
footprint 0402_R
pins: 1, 2
2 alternate drawings of the same symbol

## RTL8211F-CG
designator U?
Manufacturer: REALTEK(瑞昱); Add into BOM: yes; Name: RTL8211F-CG; Symbol: RTL8211F-CG; Device: RTL8211F-CG; LCSC Part Name: RTL8211F-CG; Supplier Part: C187932; Manufacturer Part: RTL8211F-CG; Supplier Footprint: WQFN-40-EP(5x5); JLCPCB Part Class: Extended Part; Datasheet: https://atta.szlcsc.com/upload/public/pdf/source/20190902/C187932_1913F3711F05FE1324DF2946D70D648D.pdf; Supplier: LCSC; Convert to PCB: yes; Application Function: -; Number of Channels: -; Interface: -
footprint QFN40P500X500X90-41N
3D model WQFN-40_L5.0-W5.0-P0.4-BL-EP
pins: 1 MDIP0, 2 MDIN0, 3 AVDD10, 4 MDIP1, 5 MDIN1, 6 MDIP2, 7 MDIN2, 8 AVDD10, 9 MDIP3, 10 MDIN3, 11 AVDD33, 12 PHYRSTB, 13 MDC, 14 MDIO, 15 TXD3, 16 TXD2, 17 TXD1, 18 TXD0, 19 TXCTL, 20 TXC, 21 DVDD10, 22 PHYAD0/RXD3, 23 PLLOFF/RXD2, 24 TXDLY/RXD1, 25 RXDLY/RXD0, 26 PHYAD2/RXCTL, 27 PHYAD1/RXC, 28 DVDD_RG, 29 DVDD33, 30 REG_OUT/LDO_OUT, 31 INTB/PMEB, 32 CFG_EXT/LED0, 33 CFG_LDO0/LED1, 34 CFG_LDO1/LED2, 35 CLKOUT, 36 XTAL_IN, 37 XTAL_OUT/EXT_CLK, 38 AVDD10, 39 RSET, 40 AVDD33, 41 GND

## SiT9120AI-2B1-33E25.000000
designator Y?, comment SiT9121AI-2B1-33E27.000000
Crystal or Oscillator; Manufacturer_Name: SiTime; Manufacturer_Part_Number: SiT9120AI-2B1-33E25.000000; Datasheet Link: https://www.sitime.com/support/resource-library/datasheets/sit9120-datasheet; Height: 0.9mm
footprint QFN_3225_6pins
pins: 1 NC/OE/~{ST}, 2 NC, 3 GND, 4 OUT+, 5 OUT-, 6 VDD

## SiT9120AI-2B1-33E25.000000_1
designator Y?, comment SiT9121AI-2B1-33E26.000000(NC)
Crystal or Oscillator; Manufacturer_Name: SiTime; Manufacturer_Part_Number: SiT9120AI-2B1-33E25.000000; Datasheet Link: https://www.sitime.com/support/resource-library/datasheets/sit9120-datasheet; Height: 0.9mm
footprint QFN_3225_6pins (Footprint not found)
pins: 1 NC/OE/~{ST}, 2 NC, 3 GND, 4 OUT+, 5 OUT-, 6 VDD

## SiT9120AI-2D3-33E156.250000
designator Y?
Crystal or Oscillator; Manufacturer_Name: SiTime; Datasheet Link: https://www.sitime.com/support/resource-library/datasheets/sit9120-datasheet; Height: 1mm; Manufacturer_Part_Number: SiT9120AI-2D3-33E156.250000
footprint QFN_7050_6pins
pins: 1 NC/OE/~{ST}, 2 NC, 3 GND, 4 OUT+, 5 OUT-, 6 VDD

## SM712
designator D?, comment SM24CANA-02HTG
Manufacturer: FUXINSEMI(富芯森美); Symbol: SM712_C908219; Device: SM712; Add into BOM: yes; LCSC Part Name: SM712; Supplier Part: C908219; Manufacturer Part: SM712; Supplier Footprint: SOT-23; JLCPCB Part Class: Extended Part; Datasheet: https://atta.szlcsc.com/upload/public/pdf/source/20201023/C908219_769E03D1494CFFF8E4E820FD41732678.pdf; Supplier: LCSC; Convert to PCB: yes
footprint SOT23-3L (3x1.3x1mm(长宽高))
3D model SOT-23-3P_L2.9-W1.3-H1.0-LS2.4-P0.95
pins: 1, 2, 3

## SM712_1
designator D?, comment SM712
Manufacturer: FUXINSEMI(富芯森美); Symbol: SM712_C908219; Add into BOM: yes; Device: SM712; LCSC Part Name: SM712; Supplier Part: C908219; Manufacturer Part: SM712; Supplier Footprint: SOT-23; JLCPCB Part Class: Extended Part; Datasheet: https://atta.szlcsc.com/upload/public/pdf/source/20201023/C908219_769E03D1494CFFF8E4E820FD41732678.pdf; Supplier: LCSC; Convert to PCB: yes
footprint SOT23-3L (3x1.3x1mm(长宽高))
3D model SOT-23-3P_L2.9-W1.3-H1.0-LS2.4-P0.95
pins: 1, 2, 3

## SN65HVD1050DR
designator U?, comment SN65HVD230DR
BOM_Manufacturer: TI; BOM_Manufacturer Part: SN65HVD1050DR; BOM_Supplier: LCSC; BOM_Supplier Part: C14019; BOM_JLCPCB Part Class: Extended Part; spicePre: U; spiceSymbolName: SN65HVD1050DR
footprint SOIC127P600X175-8N
pins: 1 TXD, 2 GND, 3 VCC, 4 RXD, 5 VREF, 6 CANL, 7 CANH, 8 S

## SN74AVCH4T245PWR
designator U?
Manufacturer: TI(德州仪器); Add into BOM: yes; Name: SN74AVCH4T245PWR; Symbol: SN74AVCH4T245PWR; Device: SN74AVCH4T245PWR; LCSC Part Name: SN74AVCH4T245PWR; Supplier Part: C7137; Manufacturer Part: SN74AVCH4T245PWR; Supplier Footprint: TSSOP16-44mm; JLCPCB Part Class: Extended Part; Datasheet: https://atta.szlcsc.com/upload/public/pdf/source/20140704/1457707106753.pdf; Supplier: LCSC; Convert to PCB: yes
footprint TSSOP16
3D model TSSOP-16_L5.0-W4.4-H1.0-LS6.4-P0.65
pins: 1 VCCA, 2 1DIR, 3 2DIR, 4 1A1, 5 1A2, 6 2A1, 7 2A2, 8 GND, 9 GND, 10 2B2, 11 2B1, 12 1B2, 13 1B1, 14 #2OE, 15 #1OE, 16 VCCB

## SN74LVC1T45DBVR
designator U?
Manufacturer: TI(德州仪器); Add into BOM: yes; Name: SN74LVC1T45DBVR; Symbol: SN74LVC1T45DBVR; Device: SN74LVC1T45DBVR; LCSC Part Name: SN74LVC1T45DBVR; Supplier Part: C7843; Manufacturer Part: SN74LVC1T45DBVR; Supplier Footprint: SOT-23-6; JLCPCB Part Class: Extended Part; Datasheet: https://atta.szlcsc.com/upload/public/pdf/source/20140708/1457707144772.pdf; Supplier: LCSC; Convert to PCB: yes
footprint SOT23-6L (3x1.6x1.1mm(长宽高))
3D model SOT-23-6_L2.9-W1.6-H1.5-LS2.8-P0.95
pins: 1 VCCA, 2 GND, 3 A, 4 B, 5 DIR, 6 VCCB

## SRV05-4-P-T7_C85364
designator TV?, comment SRV05-4-P-T7
Manufacturer: PROTEK; Add into BOM: yes; Reverse Stand-Off Voltage (Vrwm): 5V; Breakdown Voltage: 6V; Peak Pulse Current (Ipp)@10/1000μs: 1A@8/20us; Maximum Clamping Voltage: 12V; Name: SRV05-4-P-T7; Symbol: SRV05-4-P-T7; Device: SRV05-4-P-T7; LCSC Part Name: Vrwm:5V; Supplier Part: C85364; Manufacturer Part: SRV05-4-P-T7; Supplier Footprint: SOT-23-6; JLCPCB Part Class: Basic Part; Datasheet: https://atta.szlcsc.com/upload/public/pdf/source/20161024/1477288764689.pdf; Supplier: LCSC; Convert to PCB: yes
footprint SOT23-6L (3x1.6x1.1mm(长宽高))
3D model SOT-23-6_L2.9-W1.6-H1.5-LS2.8-P0.95
pins: 1, 2, 3, 4, 5, 6

## Test
designator M?  (value not drawn)
测试点
footprint M3x4_L (M3铜柱，长：4mm)
pins: 1

## Test_1
designator M?, comment M.2螺丝  (value not drawn)
测试点
footprint M.2 LS (M3铜柱，长：4mm)
pins: 1

## TPS54620
designator U?, comment TPS54821
PCB Footprint: VQFN_3_5
footprint TPS54622RHLR
pins: 1 RT/CLK, 2 GND1 (power), 3 GND2 (power), 4 PVIN1, 5 PVIN2, 6 VIN, 7 V_SNS, 8 COMP, 9 SS/TR, 10 EN, 11 PH2, 12 PH1, 13 BOOT, 14 PWRGD, 15 PWPD

## TS-1101-C-W
designator K?
Designer: U?; Symbol: TS-1101-C-W; Device: TS-1101-C-W
footprint TSW SMD-3*6*2.5 (3*6*2.5mm)
pins: 1, 2

## TVS
designator D?, comment SMBJ15CA
双向瞬态抑制二极管
footprint SMBJ36CATR
footprint DO-15L
footprint DO-15LV
footprint DO-15V
footprint DO-27
footprint DO-27V
footprint DO-35
footprint DO-35V
footprint DO-41
footprint DO-41G
footprint DO-41GV
footprint DO-41V
footprint DO-201AD
footprint DO-201ADV
footprint LL34 (玻封二极管)
footprint SMA/DO-214AC (塑封二极管)
footprint SMB/DO-214AA (塑封二极管)
footprint SMC/DO-214AB (塑封二极管)
footprint SOD-123 (塑封二极管)
footprint SOD-323 (塑封二极管)
footprint SOD-523 (塑封二极管)
pins: 1, 2

## TXS0102DCUTG4
designator U?, comment TXS0102DCUR
Integrated Circuit; Manufacturer_Name: Texas Instruments; Manufacturer_Part_Number: TXS0102DCUTG4; Datasheet Link: http://www.ti.com/lit/gpn/TXS0102; Height: 0.9mm; Mouser Part Number: 595-TXS0102DCUTG4; Mouser Price/Stock: https://www.mouser.co.uk/ProductDetail/Texas-Instruments/TXS0102DCUTG4?qs=0OHPnBYoB%2FliJ1RXxm0IJQ%3D%3D; Arrow Part Number: TXS0102DCUTG4; Arrow Price/Stock: https://www.arrow.com/en/products/txs0102dcutg4/texas-instruments?region=nac
footprint SOP50P310X90-8N
pins: 1 B2, 2 GND, 3 VCCA, 4 A2, 5 A1, 6 OE, 7 VCCB, 8 B1

## TXS02612RTWR
designator U?
SDIO Port Expander With Voltage-Level Translation; Manufacturer_Name: Texas Instruments; Geometry.Height: 0.8mm; Manufacturer_Part_Number: TXS02612RTWR; Mouser Part Number: 595-TXS02612RTWR; Mouser Price/Stock: https://www.mouser.co.uk/ProductDetail/Texas-Instruments/TXS02612RTWR?qs=dqESbKqT1jaNFKC1R4M7hw%3D%3D; Arrow Part Number: TXS02612RTWR; Arrow Price/Stock: https://www.arrow.com/en/products/txs02612rtwr/texas-instruments?region=nac; Datasheet Link: http://www.ti.com/lit/gpn/txs02612
footprint QFN50P400X400X80-25N-D
pins: 1 DAT2A, 2 GND_1, 3 DAT3A, 4 CMDA, 5 VCCA, 6 DAT0A, 7 DAT1A, 8 DAT2B1, 9 CLKA, 10 DAT3B1, 11 GND_2, 12 CMDB1, 13 CLKB1, 14 DAT0B1, 15 DAT1B1, 16 DAT1B0, 17 VCCB1, 18 DA0B0, 19 CLKB0, 20 CMDB0, 21 VCCB0, 22 DAT3B0, 23 DAT2B0, 24 SEL, 25 THERMAL_PAD

## TYPE-C-31-M-12
designator USB?
USB Connectors 24 Receptacle 1 8.94*7.3mm RoHS; MF: HRO Electronics Co., Ltd.; Package: Package; Price: None; Availability: Not in stock; Check_prices: https://www.snapeda.com/parts/TYPE-C-31-M-12/HRO+Electronics+Co.%252C+Ltd./view-part/?ref=eda; MP: TYPE-C-31-M-12; SnapEDA_Link: https://www.snapeda.com/parts/TYPE-C-31-M-12/HRO+Electronics+Co.%252C+Ltd./view-part/?ref=snap; Value: *
footprint HRO_TYPE-C-31-M-12
pins: A1/B12 GND (power), A4/B9 VBUS (power), A5 CC1 (io), A6 DP1 (io), A7 DN1 (io), A8 SBU1 (io), B1/A12 GND (power), B4/A9 VBUS (power), B5 CC2 (io), B6 DP2 (io), B7 DN2 (io), B8 SBU2 (io), S1 SHIELD, S2 SHIELD, S3 SHIELD, S4 SHIELD

## USB3320c
designator U?, comment USB3320
USB3320C-EZK
footprint QFN50P500X500X100-33N-D
pins: 1 CLKOUT (in), 2 NXT (power), 3 DATA0 (in), 4 DATA1 (in), 5 DATA2 (in), 6 DATA3 (in), 7 DATA4 (in), 8 REFSEL0, 9 DATA5 (in), 10 DATA6 (in), 11 REFSEL1, 12 NC (in), 13 DATA7 (in), 14 REFSEL2, 15 SPL_L, 16 SPK_R, 17 CPEN, 18 DP, 19 DM, 20 VDD33, 21 VBAT, 22 VBUS, 23 ID, 24 RBIAS (in), 25 XO, 26 REFCLK, 27 RESETB, 28 VDD18_2, 29 STP (in), 30 VDD18_1, 31 DIR (in), 32 VDDIO (in), 33 GND (in)

## USB-303WSD-BRY
designator USB?
Manufacturer: XUNPU(讯普); Add into BOM: yes; Connector Type: Type-A; Gender: 母座; Number of Contacts: 9+9; Number of Ports: 2; Current Rating - Power (Max): 1.8A; Welding Temperature (Max): 260℃; Name: USB-303WSD-BRY; Symbol: USB-303WSD-BRY; Device: USB-303WSD-BRY; LCSC Part Name: Type-A 母座 弯插 双层9短体; Supplier Part: C2895028; Manufacturer Part: USB-303WSD-BRY; Supplier Footprint: 插件; JLCPCB Part Class: Extended Part; Datasheet: https://atta.szlcsc.com/upload/public/pdf/source/20210908/0D45B3E84ED0AF593A84F7C1203CC555.pdf; Supplier: LCSC; Convert to PCB: yes; Standard: USB 3.0; Mounting Style: 弯插; Operating Temperature Range: -30℃~+85℃
footprint USB-A-TH_XUNPU_USB-303WSD-BRY
3D model USB-A-TH_XUNPU_USB-303WSD-BRY
pins: 1 VBUS1, 2 D1-, 3 D1+, 4 GND1, 5 StdA_SSRX1-, 6 StdA_SSRX1+, 7 GND_DRAIN1, 8 StdA_SSTX1-, 9 StdA_SSTX1+, 10 VBUS2, 11 D2-, 12 D2+, 13 GND2, 14 StdA_SSRX2-, 15 StdA_SSRX2+, 16 GND_DRAIN2, 17 StdA_SSTX2-, 18 StdA_SSTX2+, 19 Shield, 20 Shield, 21 Shield, 22 Shield

## W25Q256FV
designator U?, comment PM25LD512-SCE(NC)
footprint SOP8
pins: 1 /CS, 2 DO(IO1), 3 /WP(IO2), 4 GND, 5 DI(IO0), 6 CLK, 7 /HOLD(IO3), 8 VCC

## WJ15EDGVC-3.81-2P
designator J?, comment KF2EDGR-Y-3.81-2P-1G
插拔式接线端子（弯针）KF2EDGR-Y-3.81-2P-1G，品牌：凯峰; BOM_Manufacturer: ReliaPro; BOM_Manufacturer Part: WJ15EDGVC-3.81-2P; 物料编码: 6341.000873; spicePre: X; BOM_Supplier: LCSC; image: //image.lceda.cn/szlcsc/C8396.jpg; BOM_Supplier Part: C8396; spiceSymbolName: WJ15EDGVC-3.81-2P
footprint ECH381R-02P (Connector; Header; 2 Position; Right Angle)
pins: 1, 2

## XKB5858-Z
designator SW?
BOM_Manufacturer: XKB Enterprise; Contributor: LCSC; BOM_Supplier: LCSC; BOM_Supplier Part: C318868; BOM_Manufacturer Part: XKB5858-Z; BOM_JLCPCB Part Class: Extended Part; spicePre: S; spiceSymbolName: XKB5858-Z
footprint XKB5858Z
pins: 1, 2, 3, 4, 5, 6